# Altium integrated library Shunt Resistor 2512.IntLib: 1 symbol
Pins are listed as number, name and electrical type; pins without a type are passive.

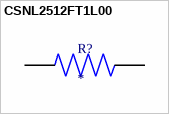
[diagram p0: symbol CSNL2512FT1L00]

## CSNL2512FT1L00
designator R?
1 mOhms Â±1% 2W Chip Resistor 2512 (6432 Metric) Current Sense, Moisture Resistant Metal Element; MF: Stackpole Electronics Inc; MP: CSNL2512FT1L00; SnapEDA_Link: https://www.snapeda.com/parts/CSNL2512FT1L00/Stackpole+Electronics/view-part/?ref=snap; Package: 6331 Stackpole; Value: *; Check_prices: https://www.snapeda.com/parts/CSNL2512FT1L00/Stackpole+Electronics/view-part/?ref=eda
footprint RESC6331X85N
pins: 1, 2